# Altium footprint library 2020-05-11_10-28-53.PcbLib: 1 footprints
Each footprint in its own frame and in the unit in brackets; x right, y up, seen from the top. Pads: shape width x height; smd on the part's side, far side on the other; paste and mask are expansions set on the pad; w line width, h text height; cw(c..) or ccw(c..) is an arc to the next point about the centre after c.
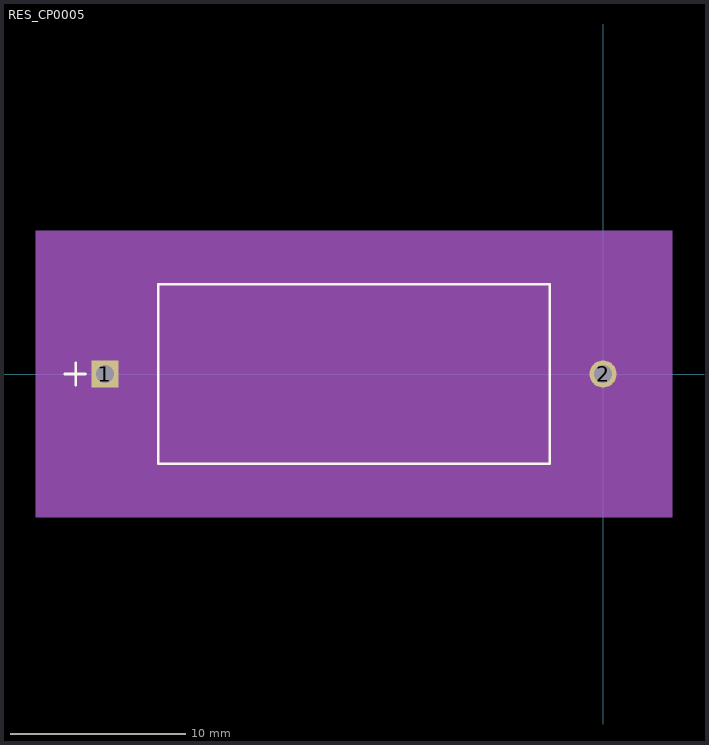
[diagram p0: the footprint, top view; thin cyan lines are the x and y axes]

## RES_CP0005 [mil]
pads (2):
  rect 61x61 hole 41: 1(-1120,0)
  round 61 hole 41: 2(0,0)
Top Overlay:
  lines w6: -1210.5,0 -1163.6,0 ; -1185.5,-25 -1185.5,25 ; -1000,-202 -120,-202 -120,202 -1000,202 -1000,-202
Mechanical 5:
  region: 155.5,-322 -1275.5,-322 -1275.5,322 155.5,322
Mechanical 7:
  lines w1: -1120,-262 -1120,0 ; -995,197 -995,262 ; -125,-197 115,-197 ; -125,262 -125,197 115,197 ; 0,-262 0,0 ; -1120,-247 0,-247 ; -1120,-247 -1110,-242 -1110,-252 -1120,-247 ; -995,247 -125,247 ; -995,247 -985,252 -985,242 -995,247 ; -125,247 -135,252 -135,242 -125,247 ; 0,-247 -10,-242 -10,-252 0,-247 ; 100,-197 100,197 ; 100,-197 95,-187 105,-187 100,-197 ; 100,197 95,187 105,187 100,197
  text "Pin 1 Pad Style: SX61Y61D41P" at -910,-397 h50
  text "Default Pad Style: EX61Y61D41P" at -935,-472 h50
  text "Alt 1 Pad Style: OX60Y90D30P" at -910,-547 h50
  text "Alt 2 Pad Style: OX90Y60D30P" at -910,-622 h50
  text "0.394in/10.008mm" at 120,-12.5 h25
  text "1.12in/28.448mm" at -653.75,-292 h25
  text "0.87in/22.098mm" at -653.75,267 h25
Mechanical 13:
  lines w1: -1210.5,0 -1160.5,0 ; -1185.5,-25 -1185.5,25 ; -1120,0 -995,0 ; -125,0 0,0 ; -995,-197 -125,-197 -125,197 -995,197 -995,-197
Mechanical 15:
  region: -1005,-40.5 -1160.5,-40.5 -1160.5,40.5 -1005,40.5 -1005,207 -115,207 -115,40.5 40.5,40.5 40.5,-40.5 -115,-40.5 -115,-207 -1005,-207
  lines w6: -1160.5,-40.5 -1160.5,40.5 -1005,40.5 -1005,207 -115,207 -115,40.5 40.5,40.5 40.5,-40.5 -115,-40.5 -115,-207 -1005,-207 -1005,-40.5 -1160.5,-40.5
3D body: height 10, standoff 0, extent 0,0 10,10